# Altium footprint library board.PcbLib: 31 footprints (part 1 of 2)
Each footprint in its own frame and in the unit in brackets; x right, y up, seen from the top. Pads: shape width x height; smd on the part's side, far side on the other; paste and mask are expansions set on the pad; w line width, h text height; cw(c..) or ccw(c..) is an arc to the next point about the centre after c.
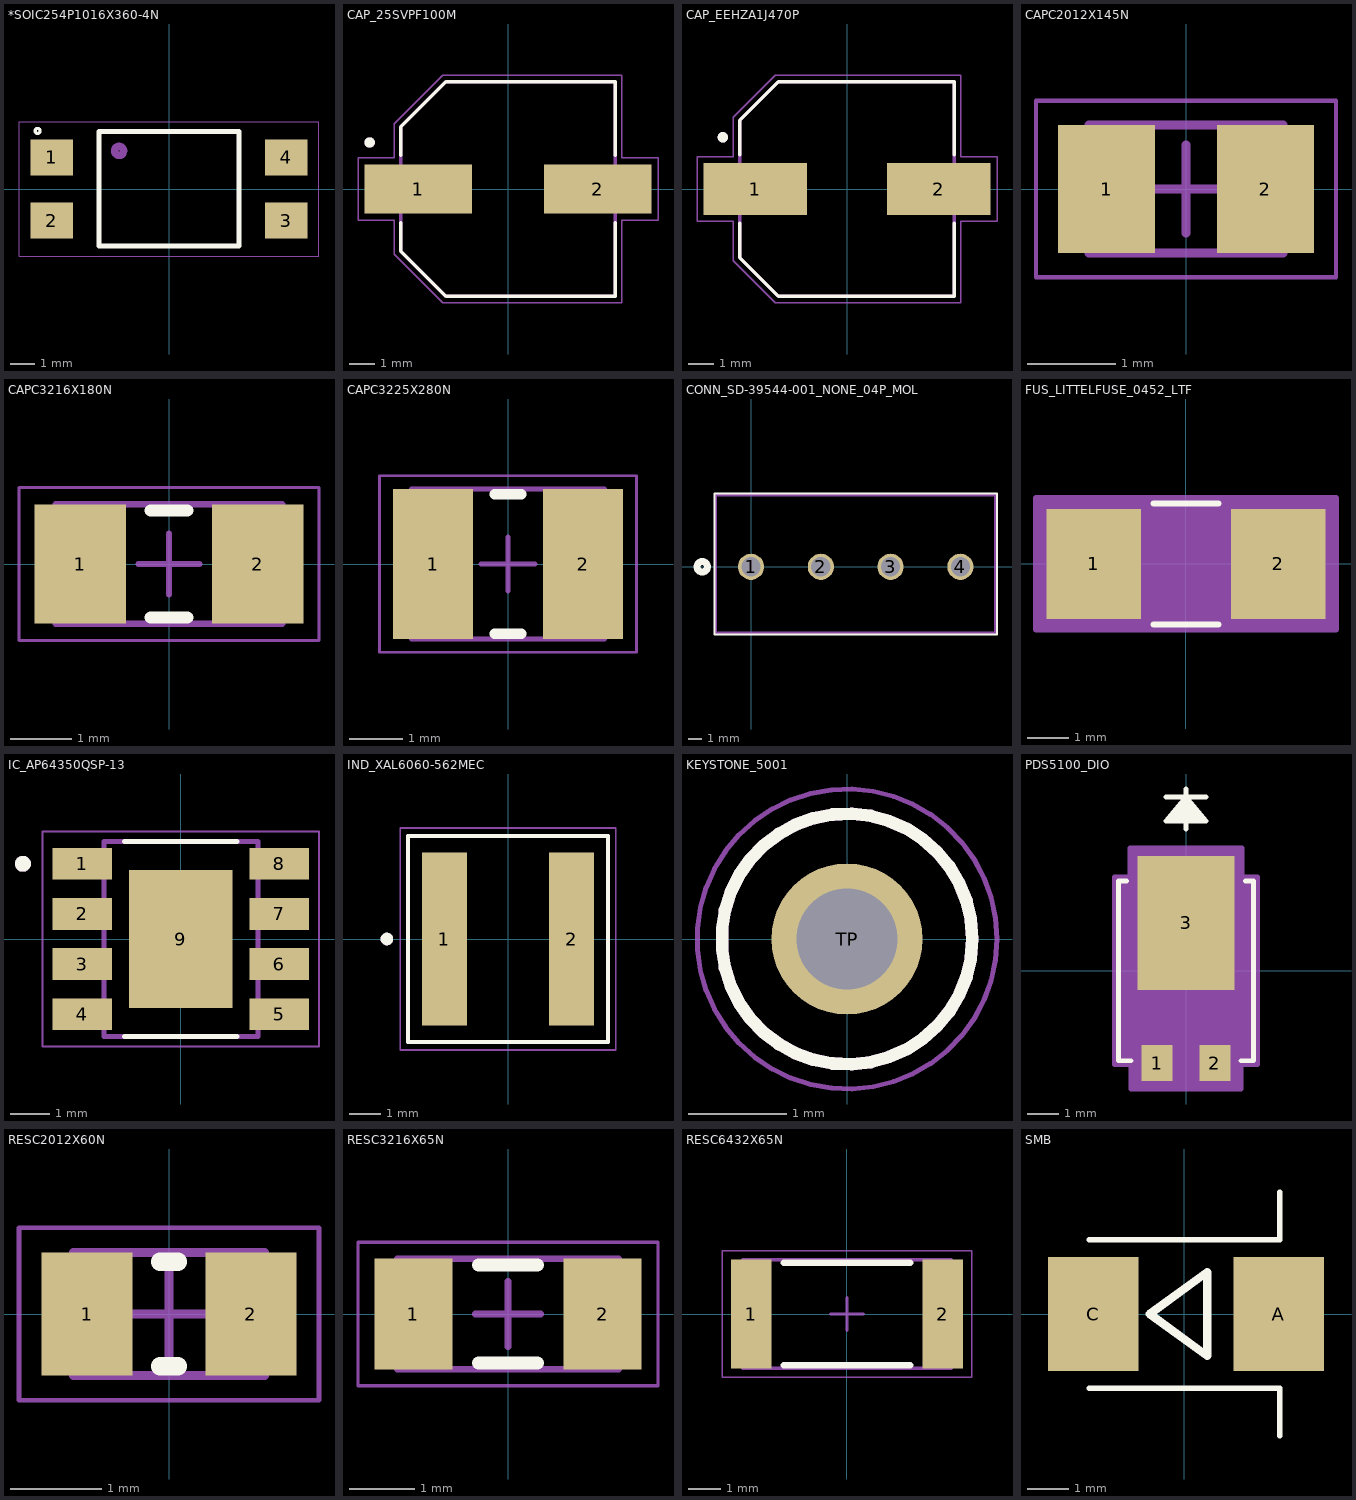
[diagram p0: the footprints below, top view; thin cyan lines are the x and y axes]

## *SOIC254P1016X360-4N [mm]
pads (4):
  rect 1.7x1.45 smd: 1(-4.7,1.27) 2(-4.7,-1.27) 3(4.7,-1.27) 4(4.7,1.27)
Top Overlay:
  circle w0.127: c-5.273,2.33 r0.1
  lines w0.2: -2.8,2.29 -2.8,-2.29 2.8,-2.29 2.8,2.29 ; -2.8,2.3 2.8,2.3
Mechanical 4:
  circle w0.3: c-2.003,1.53 r0.18
  circle w0.3: c-2.003,1.53 r0.18
Mechanical 16:
  lines w0.05: -6.02,-2.7 6.02,-2.7 6.02,2.7 -6.02,2.7 -6.02,-2.7
3D body "SFH617A-3X017T.STEP": height 3.81, standoff -0.05, extent -5.334,-2.427 4.826,2.173

## CAP_25SVPF100M [mm]
height 6.9
pads (2):
  rect 4.15x1.9 smd: 1(-3.475,0) 2(3.475,0)
Top Overlay:
  circle w0.2: c-5.35,1.8 r0.1
  lines w0.127: -4.15,-1.3 -4.15,-2.4 -2.4,-4.15 4.15,-4.15 4.15,-1.3 ; -4.15,1.3 -4.15,2.4 -2.4,4.15 4.15,4.15 4.15,1.3
Mechanical 13:
  circle w0.2: c-5.35,1.8 r0.1
  lines w0.127: -4.15,-2.4 -2.4,-4.15 4.15,-4.15 4.15,4.15 -2.4,4.15 -4.15,2.4 -4.15,-2.4
Mechanical 15:
  lines w0.05: -5.8,-1.2 -4.4,-1.2 -4.4,-2.525 -2.525,-4.4 4.4,-4.4 4.4,-1.2 5.8,-1.2 5.8,1.2 4.4,1.2 4.4,4.4 -2.525,4.4 -4.4,2.525 -4.4,1.2 -5.8,1.2 -5.8,-1.2
3D body "25SVPF100M.step": height 6.75, standoff -0.15, extent -4.373,-4.277 4.627,4.023
3D body: height 0.25, standoff 0, extent -1272.54,-1272.537 -1267.46,-1267.463

## CAP_EEHZA1J470P [mm]
height 10.2
pads (2):
  rect 4x2 smd: 1(-3.55,0) 2(3.55,0)
Top Overlay:
  circle w0.2: c-4.8,2 r0.1
  lines w0.127: -4.15,-1.32 -4.15,-2.65 -2.65,-4.15 4.15,-4.15 4.15,-1.32 ; -4.15,1.32 -4.15,2.65 -2.65,4.15 4.15,4.15 4.15,1.32
Mechanical 13:
  circle w0.2: c-4.8,2 r0.1
  lines w0.127: -4.15,-2.65 -4.15,2.65 -2.65,4.15 4.15,4.15 4.15,-4.15 -2.65,-4.15 -4.15,-2.65
Mechanical 15:
  lines w0.05: -5.8,-1.25 -4.4,-1.25 -4.4,-2.775 -2.775,-4.4 4.4,-4.4 4.4,-1.25 5.8,-1.25 5.8,1.25 4.4,1.25 4.4,4.4 -2.775,4.4 -4.4,2.775 -4.4,1.25 -5.8,1.25 -5.8,-1.25
3D body "step_temp.STEP": height 10.2, standoff 0, extent -4.85,-4.15 4.85,4.15

## CAPC2012X145N [mm] "C-0805 Cap"
height 1.45
pads (2):
  rect 1.1x1.45 smd: 1(-0.9,0) 2(0.9,0)
Mechanical 13:
  lines w0.1: -1.1,-0.725 -1.1,0.725 1.1,0.725 1.1,-0.725 -1.1,-0.725
Mechanical 15:
  lines w0.05: -1.7,-1 -1.7,1 1.7,1 1.7,-1 -1.7,-1
  lines w0.1: -0.5,0 0.5,0 ; 0,-0.5 0,0.5
3D body "CAPC2012X145N.step": height 1.45, standoff 0, extent -1.1,-0.725 1.1,0.725

## CAPC3216X180N [mm] "C-1206 Cap"
height 1.8
pads (2):
  rect 1.5x1.95 smd: 1(-1.45,0) 2(1.45,0)
Top Overlay:
  lines w0.2: -0.3,-0.875 0.3,-0.875 ; -0.3,0.875 0.3,0.875
Mechanical 13:
  lines w0.1: -1.85,-0.975 1.85,-0.975 1.85,0.975 -1.85,0.975 -1.85,-0.975
Mechanical 15:
  lines w0.05: -2.45,-1.25 2.45,-1.25 2.45,1.25 -2.45,1.25 -2.45,-1.25
  lines w0.1: -0.5,0 0.5,0 ; 0,-0.5 0,0.5
3D body "CAPC3216X180N.step": height 1.8, standoff 0, extent -1.85,-0.975 1.85,0.975

## CAPC3225X280N [mm] "C-1210 Cap"
height 2.8
pads (2):
  rect 1.5x2.8 smd: 1(-1.4,0) 2(1.4,0)
Top Overlay:
  lines w0.2: -0.25,-1.3 0.25,-1.3 ; -0.25,1.3 0.25,1.3
Mechanical 13:
  lines w0.1: -1.8,-1.4 1.8,-1.4 1.8,1.4 -1.8,1.4 -1.8,-1.4
Mechanical 15:
  lines w0.05: -2.4,-1.65 2.4,-1.65 2.4,1.65 -2.4,1.65 -2.4,-1.65
  lines w0.1: -0.5,0 0.5,0 ; 0,-0.5 0,0.5
3D body "CAPC3225X280N.step": height 2.8, standoff 0, extent -1.8,-1.4 1.8,1.4

## CONN_SD-39544-001_NONE_04P_MOL [mil]
pads (4):
  round 75 hole 55 mask+4.02: 1(0,0) 2(200,0) 3(400,0) 4(600,0)
Top Overlay:
  lines w6: -105,-194 705,-194 705,210 -105,210 -105,-194
  lines w20: -155,0 ccw(c-140,0) -125,0 ccw(c-140,0) -155,0
Bottom Overlay:
  lines w20: -155,0 ccw(c-140,0) -125,0 ccw(c-140,0) -155,0
Mechanical 13:
  lines w6: -100,-189 700,-189 700,205 -100,205 -100,-189
  lines w20: -15,0 ccw(c0,0) 15,0 ccw(c0,0) -15,0
3D body "395443004.stp": height 570, standoff -120, extent -105,-195 695,195

## FUS_LITTELFUSE_0452_LTF [mil]
pads (2):
  rect 91x106 smd paste+0 mask+0: 1(-88.5,0) 2(88.5,0)
Top Overlay:
  lines w6: -30.89,-58 30.89,-58 ; -30.89,58 30.89,58
Mechanical 13:
  lines w1: -120,-53 -120,53 ; -120,-53 120,-53 ; -120,-53 -43,-53 -43,53 -120,53 ; -120,-53 -120,53 ; -120,53 120,53 ; 120,-53 120,53 ; 120,-53 120,53 ; 120,-53 43,-53 43,53 120,53
Mechanical 15:
  region: 144,-63 -144,-63 -144,63 144,63
  lines w6: -144,-63 144,-63 144,63 -144,63 -144,-63
3D body "FUS_LITTELFUSE_0452_LTF.step": height 105.98, standoff 0, extent -120,-52.99 120,52.99

## IC_AP64350QSP-13 [mm]
height 1.45
pads (9):
  rect 1.505x0.802 smd paste+0 mask+0.102: 1(-2.498,1.905) 2(-2.498,0.635) 3(-2.498,-0.635) 4(-2.498,-1.905) 5(2.498,-1.905) 6(2.498,-0.635) 7(2.498,0.635) 8(2.498,1.905)
  rect 2.613x3.502 smd paste-3 mask+0.102: 9(0,0)
Top Overlay:
  circle w0.2: c-3.998,1.905 r0.1
  lines w0.127: -1.425,-2.475 1.425,-2.475 ; -1.425,2.475 1.425,2.475
Top Paste:
  region: 0.94,-1.38 0.18,-1.38 0.18,-0.18 0.94,-0.18
  region: -0.18,-1.38 -0.94,-1.38 -0.94,-0.18 -0.18,-0.18
  region: -0.18,0.18 -0.94,0.18 -0.94,1.38 -0.18,1.38
  region: 0.94,0.18 0.18,0.18 0.18,1.38 0.94,1.38
Mechanical 13:
  circle w0.2: c-3.998,1.905 r0.1
  lines w0.127: -1.95,-2.475 1.95,-2.475 1.95,2.475 -1.95,2.475 -1.95,-2.475
Mechanical 15:
  lines w0.05: -3.5,-2.725 3.5,-2.725 3.5,2.725 -3.5,2.725 -3.5,-2.725
3D body "SO-8EP_DIO.step": height 1.63, standoff -0.05, extent -3.048,-2.476 3.048,2.476

## IND_XAL6060-562MEC [mm]
height 3.1
pads (2):
  rect 1.43x5.5 smd paste+0 mask+0.102: 1(-2.02,0) 2(2.02,0)
Top Overlay:
  circle w0.2: c-3.85,0 r0.1
  lines w0.127: -3.18,-3.28 3.18,-3.28 3.18,3.28 -3.18,3.28 -3.18,-3.28
Mechanical 13:
  circle w0.2: c-3.85,0 r0.1
  lines w0.127: -3.18,-3.28 3.18,-3.28 3.18,3.28 -3.18,3.28 -3.18,-3.28
Mechanical 15:
  lines w0.05: -3.43,-3.53 -3.43,3.53 3.43,3.53 3.43,-3.53 -3.43,-3.53
3D body "step_temp.STEP": height 6.1, standoff 0, extent -3.18,-3.28 3.18,3.28

## KEYSTONE_5001 [mm]
height 4.57
pads (1):
  round 1.53 hole 1.02: TP(0,0)
Top Overlay:
  circle w0.127: c0,0 r1.27
Mechanical 13:
  circle w0.127: c0,0 r1.27
Mechanical 15:
  circle w0.05: c0,0 r1.52
3D body "step_temp.STEP": height 4.57, standoff -3.05, extent -1.27,-1.27 1.27,1.27

## PDS5100_DIO [mil]
pads (3):
  rect 39x44.87 smd paste+0 mask+0: 1(-36.22,-115.44) 2(36.22,-115.44)
  rect 121.97x167.56 smd paste+0 mask+0: 3(0,60)
Top Overlay:
  lines w6: -74.08,112.5 -84.5,112.5 -84.5,-112.5 -68.82,-112.5 ; -25,217.5 25,217.5 ; -20,187.5 0,217.5 ; -15,187.5 0,217.5 ; -10,187.5 0,217.5 ; -5,187.5 0,217.5 ; 0,177.5 0,227.5 ; 5,187.5 0,217.5 ; 10,187.5 0,217.5 ; 15,187.5 0,217.5 ; 20,187.5 0,217.5 ; 68.82,-112.5 84.5,-112.5 84.5,112.5 74.08,112.5 ; 0,217.5 -25,187.5 25,187.5 0,217.5
Mechanical 13:
  lines w1: -25,217.5 25,217.5 ; -20,187.5 0,217.5 ; -15,187.5 0,217.5 ; -10,187.5 0,217.5 ; -5,187.5 0,217.5 ; 0,177.5 0,227.5 ; 5,187.5 0,217.5 ; 10,187.5 0,217.5 ; 15,187.5 0,217.5 ; 20,187.5 0,217.5 ; 0,217.5 -25,187.5 25,187.5 0,217.5 ; -79.5,-107.5 -79.5,107.5 79.5,107.5 79.5,-107.5 -79.5,-107.5
Mechanical 15:
  region: 79.5,-107.5 -79.5,-107.5 -79.5,107.5 79.5,107.5
  region: -68.66,-117.5 -89.5,-117.5 -89.5,117.5 -70,117.5 -70,153.78 70,153.78 70,117.5 89.5,117.5 89.5,-117.5 68.66,-117.5 68.66,-147.87 -68.66,-147.87
  lines w6: -89.5,-117.5 -68.66,-117.5 -68.66,-147.87 68.66,-147.87 68.66,-117.5 89.5,-117.5 89.5,117.5 70,117.5 70,153.78 -70,153.78 -70,117.5 -89.5,117.5 -89.5,-117.5
3D body "PDS5100_DIO.step": height 47.09, standoff 0, extent -79.49,-130 79.49,130

## RESC2012X60N [mm] "R-0805 Res"
height 0.6
pads (2):
  rect 1x1.35 smd: 1(-0.9,0) 2(0.9,0)
Top Overlay:
  lines w0.2: -0.1,-0.575 0.1,-0.575 ; -0.1,0.575 0.1,0.575
Mechanical 13:
  lines w0.1: -1.05,-0.675 1.05,-0.675 1.05,0.675 -1.05,0.675 -1.05,-0.675
Mechanical 15:
  lines w0.05: -1.65,-0.95 1.65,-0.95 1.65,0.95 -1.65,0.95 -1.65,-0.95
  lines w0.1: -0.5,0 0.5,0 ; 0,-0.5 0,0.5
3D body "RESC2012X60N.step": height 0.6, standoff 0, extent -1.05,-0.675 1.05,0.675

## RESC3216X65N [mm] "R-1206 Res"
height 0.65
pads (2):
  rect 1.2x1.7 smd: 1(-1.45,0) 2(1.45,0)
Top Overlay:
  lines w0.2: -0.45,-0.75 0.45,-0.75 ; -0.45,0.75 0.45,0.75
Mechanical 13:
  lines w0.1: -1.7,-0.85 -1.7,0.85 1.7,0.85 1.7,-0.85 -1.7,-0.85
Mechanical 15:
  lines w0.05: -2.3,-1.1 -2.3,1.1 2.3,1.1 2.3,-1.1 -2.3,-1.1
  lines w0.1: -0.5,0 0.5,0 ; 0,-0.5 0,0.5
3D body "RESC3216X65N.step": height 0.65, standoff 0, extent -1.7,-0.85 1.7,0.85

## RESC6432X65N [mm] "R-2512 Res"
height 0.65
pads (2):
  rect 1.25x3.35 smd: 1(-2.95,0) 2(2.95,0)
Top Overlay:
  lines w0.2: -1.95,-1.575 1.95,-1.575 ; -1.95,1.575 1.95,1.575
Mechanical 13:
  lines w0.1: -3.225,-1.675 -3.225,1.675 3.225,1.675 3.225,-1.675 -3.225,-1.675
Mechanical 15:
  lines w0.05: -3.85,-1.95 -3.85,1.95 3.85,1.95 3.85,-1.95 -3.85,-1.95
  lines w0.1: -0.5,0 0.5,0 ; 0,-0.5 0,0.5
3D body "RESC6432X65N.step": height 0.65, standoff 0, extent -3.225,-1.675 3.225,1.675

## SMB [mil]
pads (2):
  rect 85x108 smd paste+0 mask+4.02: A(89,0) C(-86,0)
Top Overlay:
  lines w5: -90,-70 90,-70 90,-115 ; -90,70 90,70 90,115
  lines w8: -32.68,0 21.38,39.37 21.38,-39.37 -32.68,0
3D body "step_temp.STEP": height 96.28, standoff -0.96, extent -107.09,-70.08 107.09,70.08